# Altium footprint library Resistor.PcbLib: 85 footprints (part 3 of 6)
Each footprint in its own frame and in the unit in brackets; x right, y up, seen from the top. Pads: shape width x height; smd on the part's side, far side on the other; paste and mask are expansions set on the pad; w line width, h text height; cw(c..) or ccw(c..) is an arc to the next point about the centre after c.
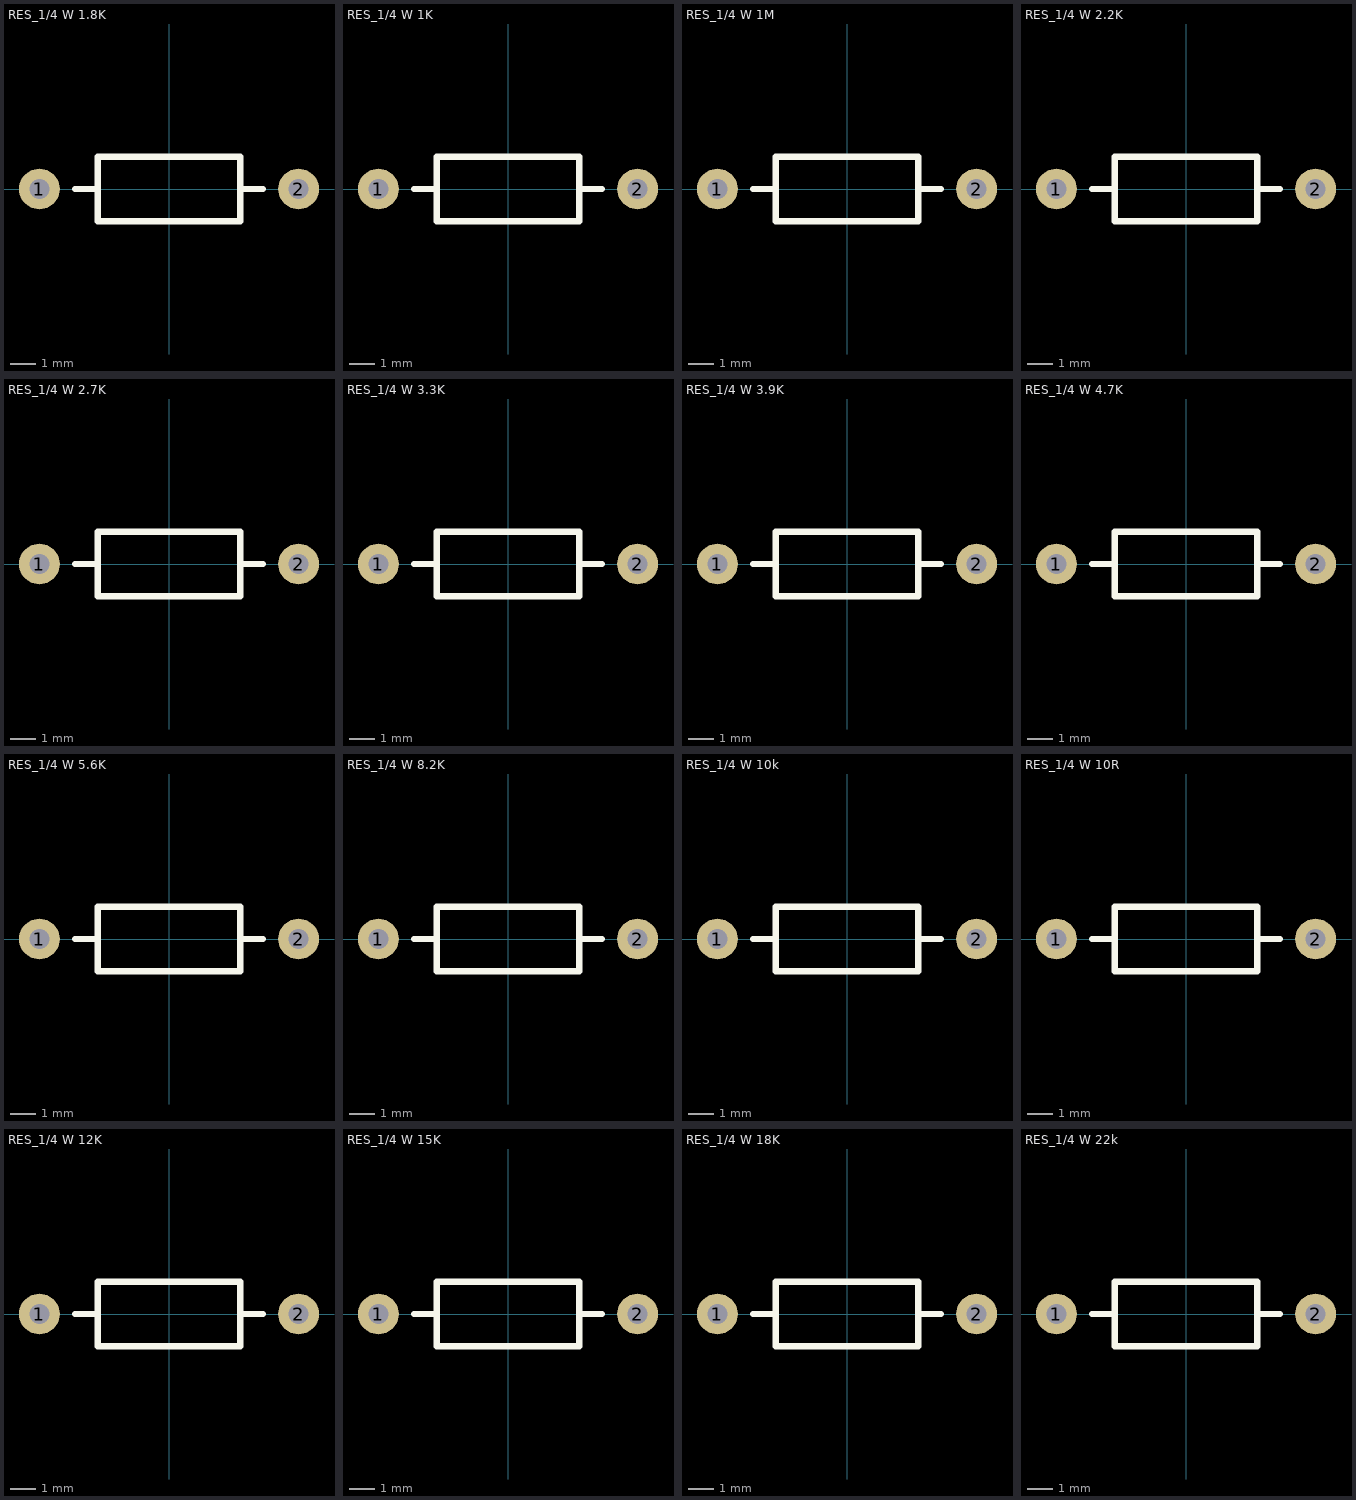
[diagram p2: the footprints below, top view; thin cyan lines are the x and y axes]

## RES_1/4 W 1.8K [mm]
pads (2):
  round 1.6 hole 0.787: 1(-5.08,0) 2(5.08,0)
Top Overlay:
  lines w0.254: -3.683,0 -2.794,0 ; 2.794,0 3.683,0 ; -2.794,-1.27 2.794,-1.27 2.794,1.27 -2.794,1.27 -2.794,-1.27
Top Designator:
  text ".Designator" at -3.71,-0.344 h1.52
3D body "1K8.step": height 2.51, standoff -2, extent -5.255,-1.151 5.255,1.152

## RES_1/4 W 1K [mm]
pads (2):
  round 1.6 hole 0.787: 1(-5.08,0) 2(5.08,0)
Top Overlay:
  lines w0.254: -3.683,0 -2.794,0 ; 2.794,0 3.683,0 ; -2.794,-1.27 2.794,-1.27 2.794,1.27 -2.794,1.27 -2.794,-1.27
Top Designator:
  text ".Designator" at -3.71,-0.344 h1.52
3D body "1K.step": height 2.51, standoff -2, extent -5.255,-1.152 5.255,1.152

## RES_1/4 W 1M [mm]
pads (2):
  round 1.6 hole 0.787: 1(-5.08,0) 2(5.08,0)
Top Overlay:
  lines w0.254: -3.683,0 -2.794,0 ; 2.794,0 3.683,0 ; -2.794,-1.27 2.794,-1.27 2.794,1.27 -2.794,1.27 -2.794,-1.27
Top Designator:
  text ".Designator" at -3.71,-0.344 h1.52
3D body "1M.step": height 2.51, standoff -2, extent -5.255,-1.152 5.255,1.152

## RES_1/4 W 2.2K [mm]
pads (2):
  round 1.6 hole 0.787: 1(-5.08,0) 2(5.08,0)
Top Overlay:
  lines w0.254: -3.683,0 -2.794,0 ; 2.794,0 3.683,0 ; -2.794,-1.27 2.794,-1.27 2.794,1.27 -2.794,1.27 -2.794,-1.27
Top Designator:
  text ".Designator" at -3.71,-0.344 h1.52
3D body "2K2.step": height 2.51, standoff -2, extent -5.255,-1.151 5.255,1.152

## RES_1/4 W 2.7K [mm]
pads (2):
  round 1.6 hole 0.787: 1(-5.08,0) 2(5.08,0)
Top Overlay:
  lines w0.254: -3.683,0 -2.794,0 ; 2.794,0 3.683,0 ; -2.794,-1.27 2.794,-1.27 2.794,1.27 -2.794,1.27 -2.794,-1.27
Top Designator:
  text ".Designator" at -3.71,-0.344 h1.52
3D body "2K7.step": height 2.51, standoff -2, extent -5.255,-1.151 5.255,1.152

## RES_1/4 W 3.3K [mm]
pads (2):
  round 1.6 hole 0.787: 1(-5.08,0) 2(5.08,0)
Top Overlay:
  lines w0.254: -3.683,0 -2.794,0 ; 2.794,0 3.683,0 ; -2.794,-1.27 -2.794,1.27 2.794,1.27 2.794,-1.27 -2.794,-1.27
Top Designator:
  text ".Designator" at -3.71,-0.344 h1.52
3D body "3K3.step": height 2.51, standoff -2, extent -5.255,-1.151 5.255,1.152

## RES_1/4 W 3.9K [mm]
pads (2):
  round 1.6 hole 0.787: 1(-5.08,0) 2(5.08,0)
Top Overlay:
  lines w0.254: -3.683,0 -2.794,0 ; 2.794,0 3.683,0 ; -2.794,-1.27 2.794,-1.27 2.794,1.27 -2.794,1.27 -2.794,-1.27
Top Designator:
  text ".Designator" at -3.71,-0.344 h1.52
3D body "3K9.step": height 2.51, standoff -2, extent -5.255,-1.151 5.255,1.152

## RES_1/4 W 4.7K [mm]
pads (2):
  round 1.6 hole 0.787: 1(-5.08,0) 2(5.08,0)
Top Overlay:
  lines w0.254: -3.683,0 -2.794,0 ; 2.794,0 3.683,0 ; -2.794,-1.27 -2.794,1.27 2.794,1.27 2.794,-1.27 -2.794,-1.27
Top Designator:
  text ".Designator" at -3.71,-0.344 h1.52
3D body "4K7.step": height 2.51, standoff -2, extent -5.255,-1.151 5.255,1.152

## RES_1/4 W 5.6K [mm]
pads (2):
  round 1.6 hole 0.787: 1(-5.08,0) 2(5.08,0)
Top Overlay:
  lines w0.254: -3.683,0 -2.794,0 ; 2.794,0 3.683,0 ; -2.794,-1.27 2.794,-1.27 2.794,1.27 -2.794,1.27 -2.794,-1.27
Top Designator:
  text ".Designator" at -3.71,-0.344 h1.52
3D body "5K6.step": height 2.51, standoff -2, extent -5.255,-1.151 5.255,1.152

## RES_1/4 W 8.2K [mm]
pads (2):
  round 1.6 hole 0.787: 1(-5.08,0) 2(5.08,0)
Top Overlay:
  lines w0.254: -3.683,0 -2.794,0 ; 2.794,0 3.683,0 ; -2.794,-1.27 -2.794,1.27 2.794,1.27 2.794,-1.27 -2.794,-1.27
Top Designator:
  text ".Designator" at -3.71,-0.344 h1.52
3D body "8K2.step": height 2.51, standoff -2, extent -5.255,-1.151 5.255,1.152

## RES_1/4 W 10k [mm]
pads (2):
  round 1.6 hole 0.787: 1(-5.08,0) 2(5.08,0)
Top Overlay:
  lines w0.254: -3.683,0 -2.794,0 ; 2.794,0 3.683,0 ; -2.794,-1.27 2.794,-1.27 2.794,1.27 -2.794,1.27 -2.794,-1.27
Top Designator:
  text ".Designator" at -3.71,-0.344 h1.52
3D body "10K.step": height 2.51, standoff -2, extent -5.255,-1.151 5.255,1.152

## RES_1/4 W 10R [mm]
pads (2):
  round 1.6 hole 0.787: 1(-5.08,0) 2(5.08,0)
Top Overlay:
  lines w0.254: -3.683,0 -2.794,0 ; 2.794,0 3.683,0 ; -2.794,-1.27 -2.794,1.27 2.794,1.27 2.794,-1.27 -2.794,-1.27
Top Designator:
  text ".Designator" at -3.71,-0.344 h1.52
3D body "10R.step": height 2.51, standoff -2, extent -5.255,-1.151 5.255,1.152

## RES_1/4 W 12K [mm]
pads (2):
  round 1.6 hole 0.787: 1(-5.08,0) 2(5.08,0)
Top Overlay:
  lines w0.254: -3.683,0 -2.794,0 ; 2.794,0 3.683,0 ; -2.794,-1.27 -2.794,1.27 2.794,1.27 2.794,-1.27 -2.794,-1.27
Top Designator:
  text ".Designator" at -3.71,-0.344 h1.52
3D body "12K.step": height 2.51, standoff -2, extent -5.255,-1.152 5.255,1.152

## RES_1/4 W 15K [mm]
pads (2):
  round 1.6 hole 0.787: 1(-5.08,0) 2(5.08,0)
Top Overlay:
  lines w0.254: -3.683,0 -2.794,0 ; 2.794,0 3.683,0 ; -2.794,-1.27 -2.794,1.27 2.794,1.27 2.794,-1.27 -2.794,-1.27
Top Designator:
  text ".Designator" at -3.71,-0.344 h1.52
3D body "15K.step": height 2.51, standoff -2, extent -5.255,-1.152 5.255,1.152

## RES_1/4 W 18K [mm]
pads (2):
  round 1.6 hole 0.787: 1(-5.08,0) 2(5.08,0)
Top Overlay:
  lines w0.254: -3.683,0 -2.794,0 ; 2.794,0 3.683,0 ; -2.794,-1.27 -2.794,1.27 2.794,1.27 2.794,-1.27 -2.794,-1.27
Top Designator:
  text ".Designator" at -3.71,-0.344 h1.52
3D body "18K.step": height 2.51, standoff -2, extent -5.255,-1.151 5.255,1.152

## RES_1/4 W 22k [mm]
pads (2):
  round 1.6 hole 0.787: 1(-5.08,0) 2(5.08,0)
Top Overlay:
  lines w0.254: -3.683,0 -2.794,0 ; 2.794,0 3.683,0 ; -2.794,-1.27 2.794,-1.27 2.794,1.27 -2.794,1.27 -2.794,-1.27
Top Designator:
  text ".Designator" at -3.71,-0.344 h1.52
3D body "22K.step": height 2.51, standoff -2, extent -5.255,-1.152 5.255,1.152